# Altium footprint library SamacSys.PcbLib: 1008 footprints (part 11 of 63)
Each footprint in its own frame and in the unit in brackets; x right, y up, seen from the top. Pads: shape width x height; smd on the part's side, far side on the other; paste and mask are expansions set on the pad; w line width, h text height; cw(c..) or ccw(c..) is an arc to the next point about the centre after c.
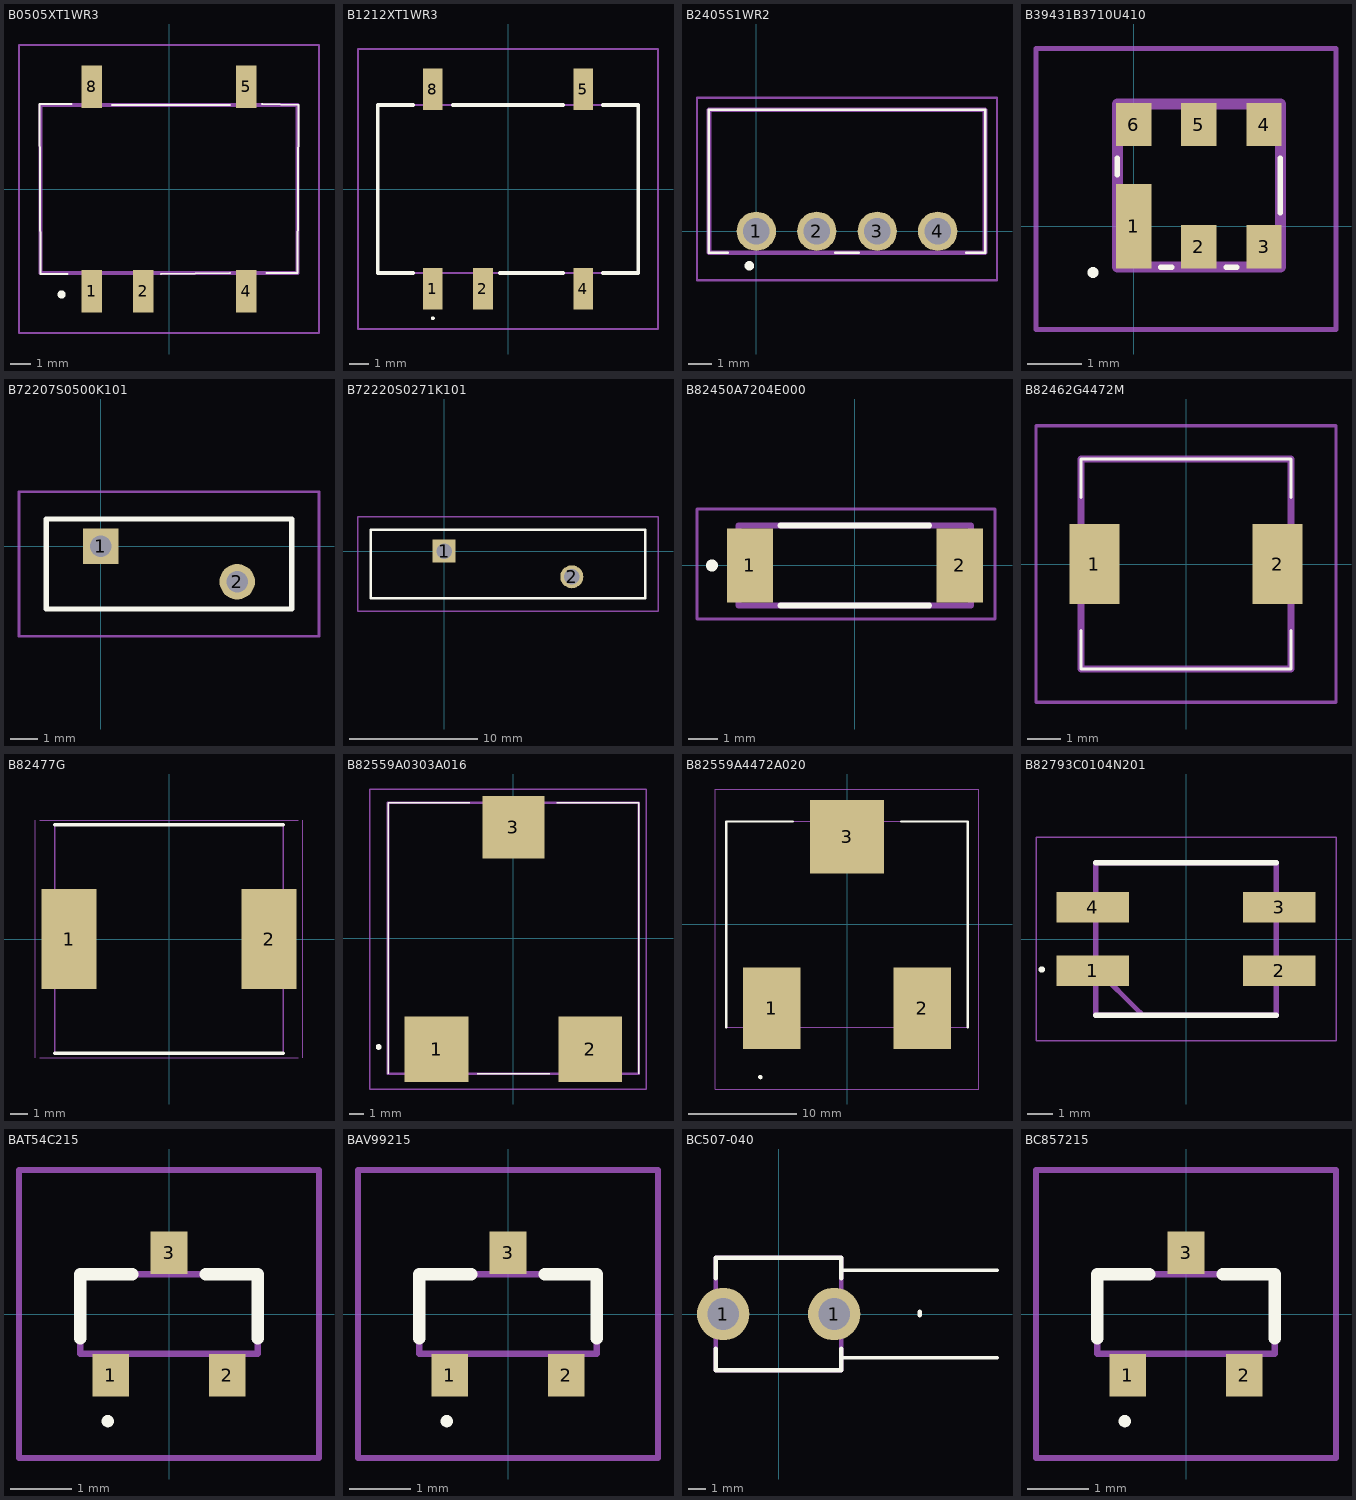
[diagram p10: the footprints below, top view; thin cyan lines are the x and y axes]

## B0505XT1WR3 [mm]
pads (5):
  rect 1x2.1 smd: 1(-3.81,-5.05) 2(-1.27,-5.05) 4(3.81,-5.05) 5(3.81,5.05) 8(-3.81,5.05)
Top Overlay:
  lines w0.1: -5,-4.2 -6.35,-4.2 -6.4,4.2 -4.8,4.2 ; -2.8,4.15 3,4.15 ; -0.4,-4.2 3,-4.15 ; 4.6,4.2 6.4,4.15 6.35,-4.15 4.8,-4.15
  lines w0.2: -5.4,-5.2 ccw(c-5.3,-5.2) -5.2,-5.2 ccw(c-5.3,-5.2) -5.4,-5.2
Assembly:
  lines w0.2: -6.35,-4.15 6.35,-4.15 6.35,4.15 -6.35,4.15 -6.35,-4.15
Countryard:
  lines w0.1: -7.4,-7.1 7.4,-7.1 7.4,7.1 -7.4,7.1 -7.4,-7.1
3D body "B0505XT-1WR3.stp": height 7.6, standoff 0, extent -6.35,-6 6.35,6

## B1212XT1WR3 [mm]
pads (5):
  rect 1x2.1 smd: 1(-3.81,-5.05) 2(-1.27,-5.05) 4(3.81,-5.05) 5(3.81,5.05) 8(-3.81,5.05)
Top Overlay:
  lines w0.1: -3.81,-6.6 cw(c-3.81,-6.55) -3.81,-6.5 cw(c-3.81,-6.55) -3.81,-6.6
  lines w0.2: -4.8,-4.25 -6.6,-4.25 -6.6,4.25 -4.8,4.25 ; -2.8,4.25 2.8,4.25 ; -0.4,-4.25 2.8,-4.25 ; 4.8,-4.25 6.6,-4.25 6.6,4.25 4.8,4.25
Assembly:
  lines w0.1: -6.6,-4.25 6.6,-4.25 6.6,4.25 -6.6,4.25 -6.6,-4.25
Countryard:
  lines w0.1: -7.6,-7.1 7.6,-7.1 7.6,7.1 -7.6,7.1 -7.6,-7.1
3D body "B1212XT-1WR3.stp": height 7.6, standoff 0, extent -6.6,-6 6.6,6

## B2405S1WR2 [mm]
pads (4):
  round 1.65 hole 1.1: 1(0,0) 2(2.54,0) 3(5.08,0) 4(7.62,0)
Top Overlay:
  lines w0.1: -1.19,-0.9 -1.99,-0.9 -1.99,5.1 9.61,5.1 9.61,-0.9 8.81,-0.9 ; 3.31,-0.9 4.31,-0.9
  lines w0.2: -0.39,-1.45 cw(c-0.29,-1.45) -0.19,-1.45 cw(c-0.29,-1.45) -0.39,-1.45
Assembly:
  lines w0.2: -1.99,-0.9 9.61,-0.9 9.61,5.1 -1.99,5.1 -1.99,-0.9
Countryard:
  lines w0.1: -2.49,-2.05 10.11,-2.05 10.11,5.6 -2.49,5.6 -2.49,-2.05
3D body "B2405S-1WR2.stp": height 10.26, standoff -5, extent -1.99,-0.9 9.61,5.1

## B39431B3710U410 [mm]
pads (6):
  rect 0.65x1.55 smd: 1(0,0)
  rect 0.65x0.8 smd: 2(1.2,-0.375) 3(2.4,-0.375) 4(2.4,1.875) 5(1.2,1.875) 6(0,1.875)
Top Overlay:
  lines w0.1: -0.3,0.95 -0.3,1.25 ; 0.5,-0.75 0.7,-0.75 ; 1.7,-0.75 1.9,-0.75 ; 2.7,0.25 2.7,1.25 ; -0.8,-0.85 cw(c-0.75,-0.85) -0.7,-0.85 cw(c-0.75,-0.85) -0.8,-0.85
Assembly:
  lines w0.2: -0.3,-0.75 -0.3,2.25 2.7,2.25 2.7,-0.75 -0.3,-0.75
Countryard:
  lines w0.1: -1.8,-1.9 -1.8,3.275 3.725,3.275 3.725,-1.9 -1.8,-1.9
3D body "B39431B3710U410.stp": height 1.33, standoff 0, extent -0.3,-0.75 2.7,2.25

## B72207S0500K101 [mm]
pads (2):
  rect 1.3x1.3 hole 0.8: 1(0,0)
  round 1.3 hole 0.8: 2(5,-1.3)
Top Overlay:
  lines w0.2: -2,-2.3 -2,1 7,1 7,-2.3 -2,-2.3
Assembly:
  lines w0.1: -2,-2.3 -2,1 7,1 7,-2.3 -2,-2.3
Countryard:
  lines w0.1: -3,-3.3 -3,2 8,2 8,-3.3 -3,-3.3
3D body "B72207S0500K101.stp": height 10.35, standoff -25.96, extent -1.65,-2.2 6.65,0.9

## B72220S0271K101 [mm]
pads (2):
  rect 1.8x1.8 hole 1.2: 1(0,0)
  round 1.8 hole 1.2: 2(10,-2)
Top Overlay:
  lines w0.2: -5.75,-3.7 -5.75,1.7 15.75,1.7 15.75,-3.7 -5.75,-3.7
Assembly:
  lines w0.1: -5.75,-3.7 -5.75,1.7 15.75,1.7 15.75,-3.7 -5.75,-3.7
Countryard:
  lines w0.1: -6.75,-4.7 -6.75,2.7 16.75,2.7 16.75,-4.7 -6.75,-4.7
3D body "B72220S0271K101.stp": height 25.23, standoff -24.27, extent -5.5,-2.9 15.5,0.9

## B82450A7204E000 [mm]
pads (2):
  rect 1.55x2.5 smd: 1(-3.525,0) 2(3.525,0)
Top Overlay:
  lines w0.2: -2.5,-1.35 2.5,-1.35 ; -2.5,1.35 2.5,1.35 ; -4.8,-0.1 cw(c-4.8,0) -4.8,0.1 cw(c-4.8,0) -4.8,-0.1
Assembly:
  lines w0.2: -3.9,-1.35 3.9,-1.35 3.9,1.35 -3.9,1.35 -3.9,-1.35
Countryard:
  lines w0.1: -5.3,-1.8 4.7,-1.8 4.7,1.9 -5.3,1.9 -5.3,-1.8
3D body: height 2.7, standoff 0, extent -3.9,-1.4 3.9,1.4

## B82462G4472M [mm]
pads (2):
  rect 1.5x2.4 smd: 1(-2.75,0) 2(2.75,0)
Top Overlay:
  lines w0.1: -3.15,-2 -3.15,-3.15 3.15,-3.15 3.15,-2 ; -3.15,2 -3.15,3.15 3.15,3.15 3.15,2
Assembly:
  lines w0.2: -3.15,-3.15 -3.15,3.15 3.15,3.15 3.15,-3.15 -3.15,-3.15
Countryard:
  lines w0.1: -4.5,-4.15 -4.5,4.15 4.5,4.15 4.5,-4.15 -4.5,-4.15
3D body "B82462G4472M.stp": height 2.92, standoff 0, extent -3.815,-3.6 3.861,3.6

## B82477G [mm] "TDK Inductor"
height 8
pads (2):
  rect 3.1x5.6 smd: 1(-5.6,0) 2(5.6,0)
Top Overlay:
  lines w0.2: -6.4,-6.4 6.4,-6.4 ; -6.4,6.4 6.4,6.4
Assembly:
  lines w0.1: -6.4,-6.4 6.4,-6.4 6.4,6.4 -6.4,6.4 -6.4,-6.4
Countryard:
  lines w0.05: -7.5,-6.65 -7.5,6.65 ; -7.225,-6.65 7.225,-6.65 ; -7.225,6.65 7.225,6.65 ; 7.5,-6.65 7.5,6.65
3D body "B82477G4333M.stp": height 8, standoff 0, extent -6.4,-6.4 6.4,6.4

## B82559A0303A016 [mm]
pads (3):
  rect 4.4x4.5 smd: 1(-5.3,-7.65) 2(5.3,-7.65)
  rect 4.3x4.3 smd: 3(0,7.65)
Top Overlay:
  lines w0.1: -8.65,-9.35 -8.65,9.35 -3,9.35 ; -2.5,-9.35 2.5,-9.35 ; 3,9.35 8.65,9.35 8.65,-9.35
  lines w0.2: -9.3,-7.6 cw(c-9.3,-7.5) -9.3,-7.4 cw(c-9.3,-7.5) -9.3,-7.6
Assembly:
  lines w0.2: -8.65,-9.35 8.65,-9.35 8.65,9.35 -8.65,9.35 -8.65,-9.35
Countryard:
  lines w0.1: -9.9,-10.4 9.15,-10.4 9.15,10.3 -9.9,10.3 -9.9,-10.4
3D body "B82559A0303A016.stp": height 11.05, standoff 0, extent -8.65,-9.46 8.65,9.37

## B82559A4472A020 [mm]
pads (3):
  rect 5.3x7.5 smd: 1(-6.95,-7.75) 2(6.95,-7.75)
  rect 6.8x6.8 smd: 3(0,8.1)
Top Overlay:
  lines w0.2: -11.15,-9.5 -11.15,9.5 -5,9.5 ; 5,9.5 11.15,9.5 11.15,-9.5 ; -8,-14.2 ccw(c-8,-14.1) -8,-14 ccw(c-8,-14.1) -8,-14.2
Assembly:
  lines w0.1: -11.15,-9.5 -11.15,9.5 11.15,9.5 11.15,-9.5 -11.15,-9.5
Countryard:
  lines w0.1: -12.15,-15.2 -12.15,12.5 12.15,12.5 12.15,-15.2 -12.15,-15.2
3D body "B82559A4472A020.stp": height 10.2, standoff 0, extent -11.1,-11.303 11.2,10.703

## B82793C0104N201 [mm]
pads (4):
  rect 2.85x1.2 smd: 1(-3.675,-1.25) 2(3.675,-1.25) 3(3.675,1.25) 4(-3.675,1.25)
Top Overlay:
  lines w0.2: -3.55,-3 3.55,-3 ; -3.55,3 3.55,3 ; -5.7,-1.2 cw(c-5.675,-1.2) -5.65,-1.2 cw(c-5.675,-1.2) -5.7,-1.2
Assembly:
  lines w0.1: -3.5,-1.1 -3.5,-1
  lines w0.2: -1.8,-2.9 -3.5,-1.2 ; -3.5,-1.2 -3.5,-1.2 ; -3.55,-3 -3.55,3 3.55,3 3.55,-3 -3.55,-3
Countryard:
  lines w0.05: -5.9,-4 -5.9,4 5.9,4 5.9,-4 -5.9,-4
3D body "B82793S0513N201.stp": height 4.61, standoff 0, extent -4.568,-2.95 4.568,2.95

## BAT54C215 [mm]
pads (3):
  rect 0.6x0.7 smd: 1(-0.95,-1) 2(0.95,-1) 3(0,1)
Top Overlay:
  lines w0.1: -1,-1.8 cw(c-1,-1.75) -1,-1.7 cw(c-1,-1.75) -1,-1.8
  lines w0.2: -1.45,-0.4 -1.45,0.65 -0.6,0.65 ; 0.6,0.65 1.45,0.65 1.45,-0.4
Assembly:
  lines w0.1: -1.45,-0.65 -1.45,0.65 1.45,0.65 1.45,-0.65 -1.45,-0.65
Countryard:
  lines w0.1: -2.45,-2.35 -2.45,2.35 2.45,2.35 2.45,-2.35 -2.45,-2.35
3D body "BAT54C,215.stp": height 0.95, standoff 0, extent -1.452,-1.201 1.448,1.199

## BAV99215 [mm]
pads (3):
  rect 0.6x0.7 smd: 1(-0.95,-1) 2(0.95,-1) 3(0,1)
Top Overlay:
  lines w0.1: -1,-1.8 ccw(c-1,-1.75) -1,-1.7 ccw(c-1,-1.75) -1,-1.8
  lines w0.2: -1.45,-0.4 -1.45,0.65 -0.6,0.65 ; 0.6,0.65 1.45,0.65 1.45,-0.4
Assembly:
  lines w0.1: -1.45,-0.65 1.45,-0.65 1.45,0.65 -1.45,0.65 -1.45,-0.65
Countryard:
  lines w0.1: -2.45,-2.35 2.45,-2.35 2.45,2.35 -2.45,2.35 -2.45,-2.35
3D body "BAV99,215.stp": height 0.95, standoff 0, extent -1.452,-1.201 1.448,1.199

## BC507-040 [mm]
pads (2):
  round 2.98 hole 1.8: 1(-3.15,0) 1(3.15,0)
Top Overlay:
  lines w0.2: 3.6,-2.475 12.4,-2.475 ; 3.6,2.475 12.4,2.475
  lines w0.254: -3.563,-1.975 -3.563,-3.2 3.547,-3.2 3.547,-1.975 ; -3.563,2.025 -3.563,3.2 3.547,3.2 3.547,2.025 ; 8,-0.075 8,0.125
Assembly:
  lines w0.254: -3.563,-3.2 -3.563,3.2 3.547,3.2 3.547,-3.2 -3.563,-3.2
3D body "User Library-FC-211.step": height 8.63, standoff -3.56, extent -3.611,-3.17 3.611,3.17

## BC857215 [mm]
pads (3):
  rect 0.6x0.7 smd: 1(-0.95,-1) 2(0.95,-1) 3(0,1)
Top Overlay:
  lines w0.1: -1,-1.8 ccw(c-1,-1.75) -1,-1.7 ccw(c-1,-1.75) -1,-1.8
  lines w0.2: -1.45,-0.4 -1.45,0.65 -0.6,0.65 ; 0.6,0.65 1.45,0.65 1.45,-0.4
Assembly:
  lines w0.1: -1.45,-0.65 1.45,-0.65 1.45,0.65 -1.45,0.65 -1.45,-0.65
Countryard:
  lines w0.1: -2.45,-2.35 2.45,-2.35 2.45,2.35 -2.45,2.35 -2.45,-2.35
3D body "BC857,215.stp": height 0.95, standoff 0, extent -1.452,-1.201 1.448,1.199